# Altium footprint library 2019-09-10_15-04-13.PcbLib: 3 footprints
Each footprint in its own frame and in the unit in brackets; x right, y up, seen from the top. Pads: shape width x height; smd on the part's side, far side on the other; paste and mask are expansions set on the pad; w line width, h text height; cw(c..) or ccw(c..) is an arc to the next point about the centre after c.
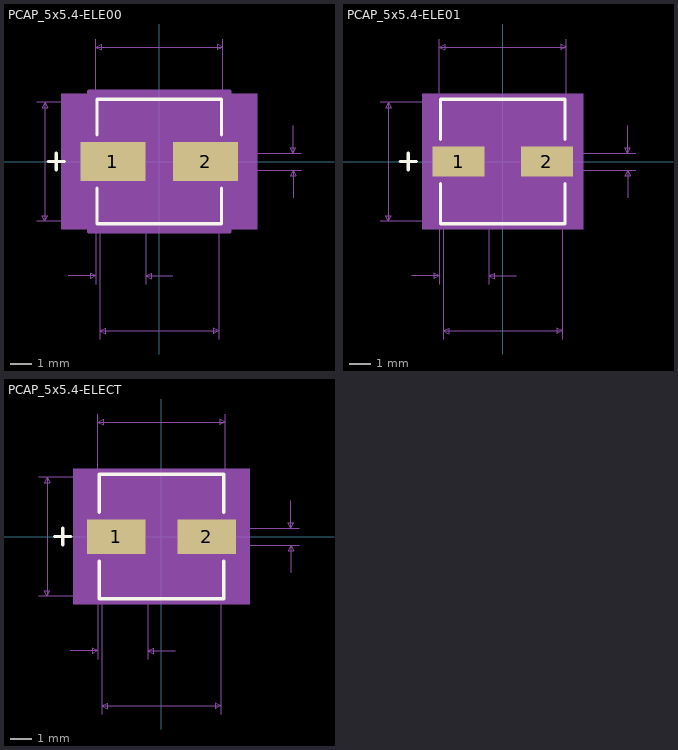
[diagram p0: the footprints below, top view; thin cyan lines are the x and y axes]

## PCAP_5x5.4-ELE00 [mil]
pads (2):
  rect 119x71 smd paste+0 mask+0: 1(-84.5,0) 2(84.5,0)
Top Overlay:
  lines w6: -203,0 -173,0 ; -188,-15 -188,15 ; -113.5,-48.6 -113.5,-113.5 113.5,-113.5 113.5,-48.6 ; -113.5,48.6 -113.5,113.5 113.5,113.5 113.5,48.6
Mechanical 5:
  region: 179,-123.5 -179,-123.5 -179,123.5 179,123.5
Mechanical 7:
  lines w1: -223.5,-108.5 -108.5,-108.5 -108.5,-323.5 ; -223.5,108.5 -108.5,108.5 ; -166,-208.5 -116,-208.5 ; -116,-223.5 -116,-45.5 ; -116,45.5 -116,223.5 ; -25,-223.5 -25,-25.5 ; 25,-208.5 -25,-208.5 ; 108.5,-323.5 108.5,-108.5 ; 116,45.5 116,223.5 ; 154,-15.5 259,-15.5 ; 154,15.5 259,15.5 ; 244,-65.5 244,-15.5 ; 244,65.5 244,15.5 ; -208.5,-108.5 -208.5,108.5 ; -208.5,-108.5 -213.5,-98.5 -203.5,-98.5 -208.5,-108.5 ; -208.5,108.5 -213.5,98.5 -203.5,98.5 -208.5,108.5 ; -116,-208.5 -126,-203.5 -126,-213.5 -116,-208.5 ; -116,208.5 116,208.5 ; -116,208.5 -106,213.5 -106,203.5 -116,208.5 ; -108.5,-308.5 108.5,-308.5 ; -108.5,-308.5 -98.5,-303.5 -98.5,-313.5 -108.5,-308.5 ; -25,-208.5 -15,-203.5 -15,-213.5 -25,-208.5 ; 108.5,-308.5 98.5,-303.5 98.5,-313.5 108.5,-308.5 ; 116,208.5 106,213.5 106,203.5 116,208.5 ; 244,-15.5 239,-25.5 249,-25.5 244,-15.5 ; 244,15.5 239,25.5 249,25.5 244,15.5
  text "Default Padstyle: RX119Y71D0T" at -362.5,-439.5 h50
  text "Alternate 1 Padstyle: OX60Y90D30P" at -412.5,-539.5 h50
  text "Alternate 2 Padstyle: OX90Y60D30P" at -412.5,-639.5 h50
  text "0.031in/0.787mm" at 264,-12.5 h25
  text "0.232in/5.893mm" at -93.75,228.5 h25
  text "0.217in/5.512mm" at -416,-12.5 h25
  text "0.091in/2.311mm" at -164.25,-253.5 h25
  text "0.217in/5.512mm" at -93.75,-353.5 h25
Mechanical 13:
  lines w1: -203,0 -173,0 ; -188,-15 -188,15 ; -108.5,-54.25 -54.25,-108.5 ; -108.5,54.25 -54.25,108.5 ; -108.5,-108.5 108.5,-108.5 108.5,108.5 -108.5,108.5 -108.5,-108.5
Mechanical 15:
  region: -128.5,-55.5 -164,-55.5 -164,55.5 -128.5,55.5 -128.5,128.5 128.5,128.5 128.5,55.5 164,55.5 164,-55.5 128.5,-55.5 128.5,-128.5 -128.5,-128.5
  lines w6: -164,-55.5 -164,55.5 -128.5,55.5 -128.5,128.5 128.5,128.5 128.5,55.5 164,55.5 164,-55.5 128.5,-55.5 128.5,-128.5 -128.5,-128.5 -128.5,-55.5 -164,-55.5
3D body: height 10, standoff 0, extent 0,0 10,10

## PCAP_5x5.4-ELE01 [mil]
pads (2):
  rect 95x55 smd paste+0 mask+0: 1(-80.5,0) 2(80.5,0)
Top Overlay:
  lines w6: -187,0 -157,0 ; -172,-15 -172,15 ; -113.5,-40.6 -113.5,-113.5 113.5,-113.5 113.5,-40.6 ; -113.5,40.6 -113.5,113.5 113.5,113.5 113.5,40.6
Mechanical 5:
  region: 147,-123.5 -147,-123.5 -147,123.5 147,123.5
Mechanical 7:
  lines w1: -223.5,-108.5 -108.5,-108.5 -108.5,-323.5 ; -223.5,108.5 -108.5,108.5 ; -166,-208.5 -116,-208.5 ; -116,-223.5 -116,-37.5 ; -116,37.5 -116,223.5 ; -25,-223.5 -25,-17.5 ; 25,-208.5 -25,-208.5 ; 108.5,-323.5 108.5,-108.5 ; 116,37.5 116,223.5 ; 138,-15.5 243,-15.5 ; 138,15.5 243,15.5 ; 228,-65.5 228,-15.5 ; 228,65.5 228,15.5 ; -208.5,-108.5 -208.5,108.5 ; -208.5,-108.5 -213.5,-98.5 -203.5,-98.5 -208.5,-108.5 ; -208.5,108.5 -213.5,98.5 -203.5,98.5 -208.5,108.5 ; -116,-208.5 -126,-203.5 -126,-213.5 -116,-208.5 ; -116,208.5 116,208.5 ; -116,208.5 -106,213.5 -106,203.5 -116,208.5 ; -108.5,-308.5 108.5,-308.5 ; -108.5,-308.5 -98.5,-303.5 -98.5,-313.5 -108.5,-308.5 ; -25,-208.5 -15,-203.5 -15,-213.5 -25,-208.5 ; 108.5,-308.5 98.5,-303.5 98.5,-313.5 108.5,-308.5 ; 116,208.5 106,213.5 106,203.5 116,208.5 ; 228,-15.5 223,-25.5 233,-25.5 228,-15.5 ; 228,15.5 223,25.5 233,25.5 228,15.5
  text "Default Padstyle: RX95Y55D0T" at -350,-447.5 h50
  text "Alternate 1 Padstyle: OX60Y90D30P" at -412.5,-547.5 h50
  text "Alternate 2 Padstyle: OX90Y60D30P" at -412.5,-647.5 h50
  text "0.031in/0.787mm" at 248,-12.5 h25
  text "0.232in/5.893mm" at -93.75,228.5 h25
  text "0.217in/5.512mm" at -416,-12.5 h25
  text "0.091in/2.311mm" at -164.25,-253.5 h25
  text "0.217in/5.512mm" at -93.75,-353.5 h25
Mechanical 13:
  lines w1: -187,0 -157,0 ; -172,-15 -172,15 ; -108.5,-54.25 -54.25,-108.5 ; -108.5,54.25 -54.25,108.5 ; -108.5,-108.5 108.5,-108.5 108.5,108.5 -108.5,108.5 -108.5,-108.5
Mechanical 15:
  region: -112.5,-31.5 -132,-31.5 -132,31.5 -112.5,31.5 -112.5,112.5 112.5,112.5 112.5,31.5 132,31.5 132,-31.5 112.5,-31.5 112.5,-112.5 -112.5,-112.5
  lines w6: -132,-31.5 -132,31.5 -112.5,31.5 -112.5,112.5 112.5,112.5 112.5,31.5 132,31.5 132,-31.5 112.5,-31.5 112.5,-112.5 -112.5,-112.5 -112.5,-31.5 -132,-31.5
3D body: height 10, standoff 0, extent 0,0 10,10

## PCAP_5x5.4-ELECT [mil]
pads (2):
  rect 107x63 smd paste+0 mask+0: 1(-82.5,0) 2(82.5,0)
Top Overlay:
  lines w6: -195,0 -165,0 ; -180,-15 -180,15 ; -113.5,-44.6 -113.5,-113.5 113.5,-113.5 113.5,-44.6 ; -113.5,44.6 -113.5,113.5 113.5,113.5 113.5,44.6
Mechanical 5:
  region: 161,-123.5 -161,-123.5 -161,123.5 161,123.5
Mechanical 7:
  lines w1: -223.5,-108.5 -108.5,-108.5 -108.5,-323.5 ; -223.5,108.5 -108.5,108.5 ; -166,-208.5 -116,-208.5 ; -116,-223.5 -116,-41.5 ; -116,41.5 -116,223.5 ; -25,-223.5 -25,-21.5 ; 25,-208.5 -25,-208.5 ; 108.5,-323.5 108.5,-108.5 ; 116,41.5 116,223.5 ; 146,-15.5 251,-15.5 ; 146,15.5 251,15.5 ; 236,-65.5 236,-15.5 ; 236,65.5 236,15.5 ; -208.5,-108.5 -208.5,108.5 ; -208.5,-108.5 -213.5,-98.5 -203.5,-98.5 -208.5,-108.5 ; -208.5,108.5 -213.5,98.5 -203.5,98.5 -208.5,108.5 ; -116,-208.5 -126,-203.5 -126,-213.5 -116,-208.5 ; -116,208.5 116,208.5 ; -116,208.5 -106,213.5 -106,203.5 -116,208.5 ; -108.5,-308.5 108.5,-308.5 ; -108.5,-308.5 -98.5,-303.5 -98.5,-313.5 -108.5,-308.5 ; -25,-208.5 -15,-203.5 -15,-213.5 -25,-208.5 ; 108.5,-308.5 98.5,-303.5 98.5,-313.5 108.5,-308.5 ; 116,208.5 106,213.5 106,203.5 116,208.5 ; 236,-15.5 231,-25.5 241,-25.5 236,-15.5 ; 236,15.5 231,25.5 241,25.5 236,15.5
  text "Default Padstyle: RX107Y63D0T" at -362.5,-443.5 h50
  text "Alternate 1 Padstyle: OX60Y90D30P" at -412.5,-543.5 h50
  text "Alternate 2 Padstyle: OX90Y60D30P" at -412.5,-643.5 h50
  text "0.031in/0.787mm" at 256,-12.5 h25
  text "0.232in/5.893mm" at -93.75,228.5 h25
  text "0.217in/5.512mm" at -416,-12.5 h25
  text "0.091in/2.311mm" at -164.25,-253.5 h25
  text "0.217in/5.512mm" at -93.75,-353.5 h25
Mechanical 13:
  lines w1: -195,0 -165,0 ; -180,-15 -180,15 ; -108.5,-54.25 -54.25,-108.5 ; -108.5,54.25 -54.25,108.5 ; -108.5,-108.5 108.5,-108.5 108.5,108.5 -108.5,108.5 -108.5,-108.5
Mechanical 15:
  region: -118.5,-41.5 -146,-41.5 -146,41.5 -118.5,41.5 -118.5,118.5 118.5,118.5 118.5,41.5 146,41.5 146,-41.5 118.5,-41.5 118.5,-118.5 -118.5,-118.5
  lines w6: -146,-41.5 -146,41.5 -118.5,41.5 -118.5,118.5 118.5,118.5 118.5,41.5 146,41.5 146,-41.5 118.5,-41.5 118.5,-118.5 -118.5,-118.5 -118.5,-41.5 -146,-41.5
3D body: height 10, standoff 0, extent 0,0 10,10